# Altium footprint library Smart-PS.PcbLib: 26 footprints (part 1 of 2)
Each footprint in its own frame and in the unit in brackets; x right, y up, seen from the top. Pads: shape width x height; smd on the part's side, far side on the other; paste and mask are expansions set on the pad; w line width, h text height; cw(c..) or ccw(c..) is an arc to the next point about the centre after c.
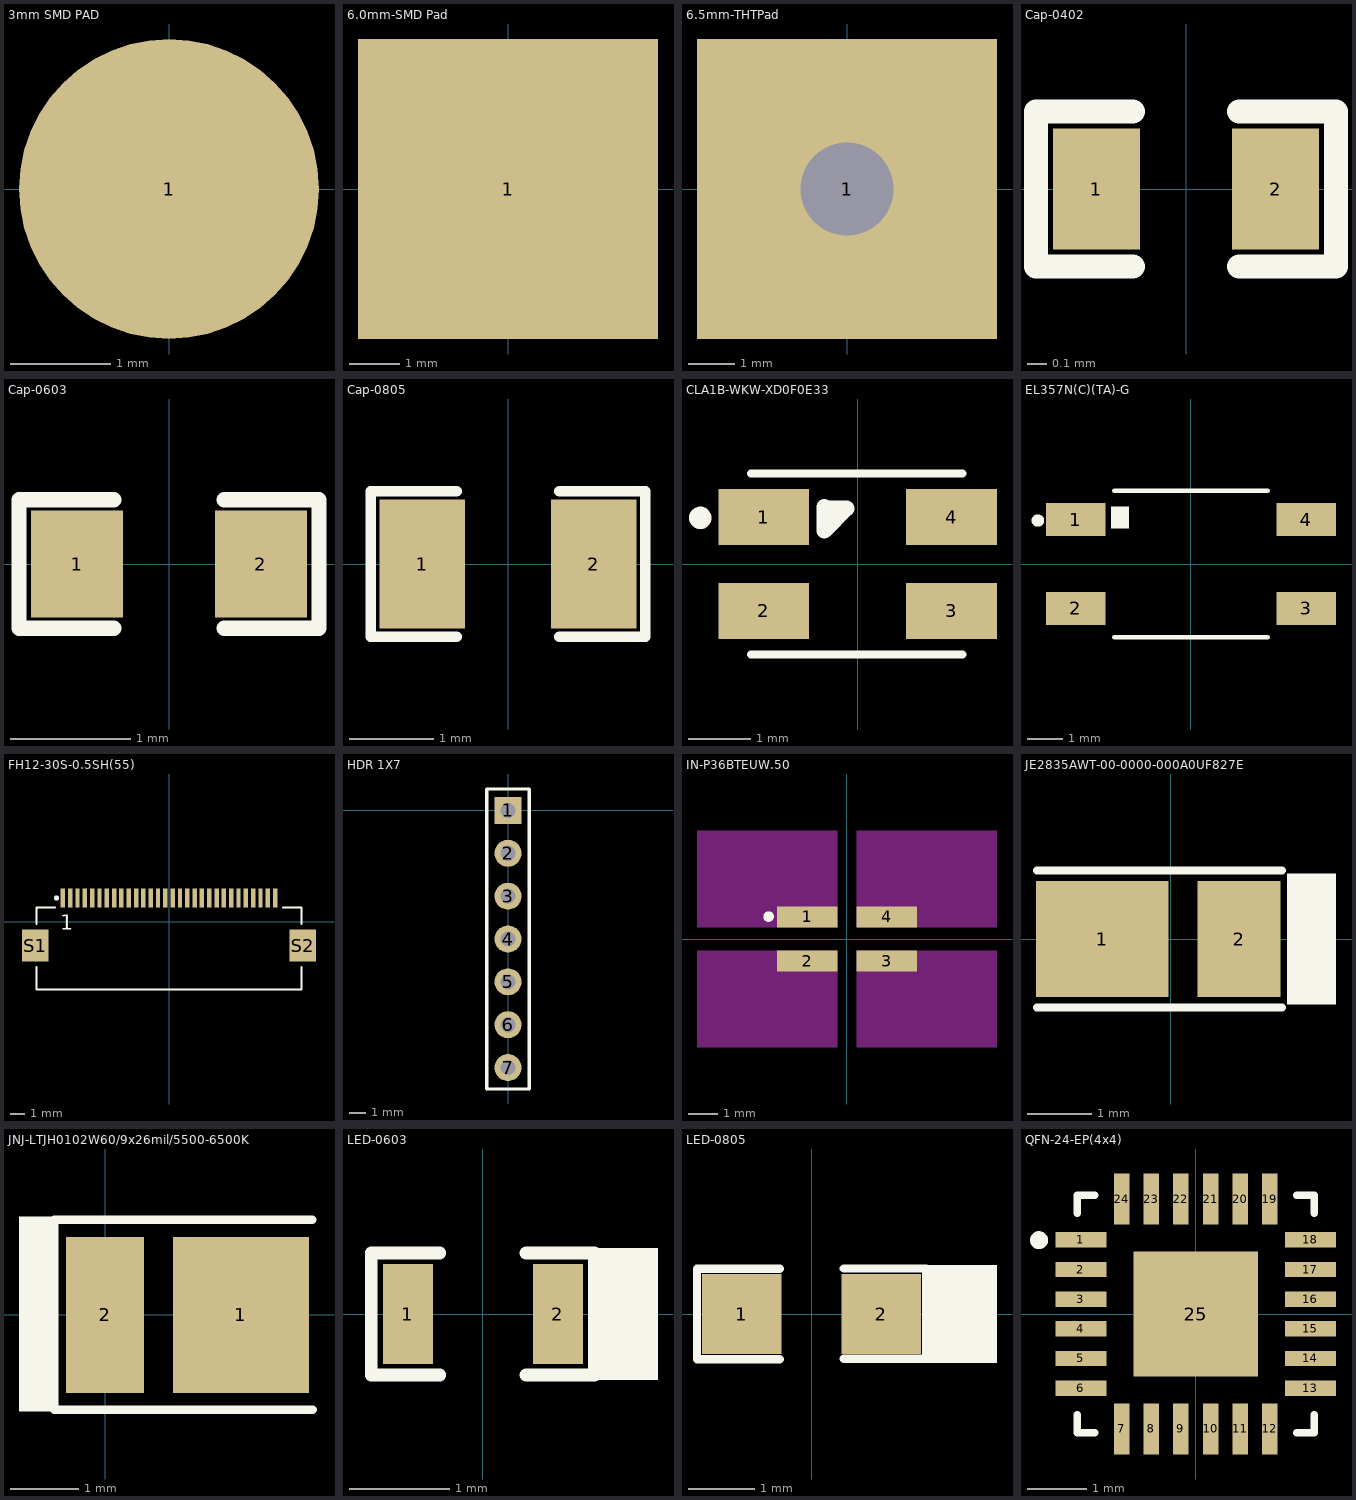
[diagram p0: the footprints below, top view; thin cyan lines are the x and y axes]

## 3mm SMD PAD [mm]
pads (1):
  round 3 smd: 1(0,0)

## 6.0mm-SMD Pad [mm]
pads (1):
  rect 6x6 smd: 1(0,0)

## 6.5mm-THTPad [mil]
pads (1):
  rect 254x254 hole 78.74: 1(0,0)

## Cap-0402 [mil]
pads (2):
  rect 18x25 smd mask+2.36: 1(-18.5,0) 2(18.5,0)
Top Overlay:
  lines w5: -11,-16 -31,-16 -31,16 -11,16 ; 11,-16 31,-16 31,16 11,16
3D body "User Library-Capacitor 0402.step": height 18.5, standoff -1.18, extent -19.68,-9.84 19.7,9.85

## Cap-0603 [mil]
pads (2):
  rect 30x35 smd mask+2.36: 1(-30,0) 2(30,0)
Top Overlay:
  lines w5: -18,-21 -49,-21 -49,21 -18,21 ; 18,-21 49,-21 49,21 18,21
3D body "User Library-CAPC1608X09.step": height 34.25, standoff -1.18, extent -31.51,-15.75 31.49,15.74

## Cap-0805 [mil] "SMD 0805"
pads (2):
  rect 40x60 smd mask+2.76: 1(-40,0) 2(40,0)
Top Overlay:
  lines w5: -24,-34 -64,-34 -64,34 -24,34 ; 24,-34 64,-34 64,34 24,34
3D body "User Library-0805 SMD Capacitor.step": height 30, standoff -0.79, extent -39.36,-24.6 39.38,24.61

## CLA1B-WKW-XD0F0E33 [mm]
pads (4):
  rect 1.45x0.9 smd: 1(-1.5,0.75) 2(-1.5,-0.75) 3(1.5,-0.75) 4(1.5,0.75)
Top Overlay:
  circle w0.254: c-2.515,0.737 r0.051
  lines w0.127: -1.702,-1.448 1.676,-1.448 ; -1.702,1.448 1.676,1.448
  lines w0.254: -0.533,0.914 -0.533,0.533 -0.178,0.889 -0.508,0.889
3D body "step_temp.STEP": height 2.1, standoff 0, extent -1.75,-1.4 1.75,1.4

## EL357N(C)(TA)-G [mm]
pads (4):
  rect 1.7x0.95 smd paste+0 mask+0.051: 1(-3.3,1.27) 2(-3.3,-1.27) 3(3.3,-1.27) 4(3.3,1.27)
Top Overlay:
  circle w0.254: c-4.383,1.244 r0.051
  rectangle: -2.284,1.016 -1.776,1.651
  lines w0.127: -2.2,-2.1 2.2,-2.1 ; -2.2,2.1 2.2,2.1

## FH12-30S-0.5SH(55) [mm]
pads (32):
  rect 0.3x1.3 smd paste-2: 1(-7.25,1.625) 2(-6.75,1.625) 3(-6.25,1.625) 4(-5.75,1.625) 5(-5.25,1.625) 6(-4.75,1.625) 7(-4.25,1.625) 8(-3.75,1.625) 9(-3.25,1.625) 10(-2.75,1.625) 11(-2.25,1.625) 12(-1.75,1.625) 13(-1.25,1.625) 14(-0.75,1.625) 15(-0.25,1.625) 16(0.25,1.625) 17(0.75,1.625) 18(1.25,1.625) 19(1.75,1.625) 20(2.25,1.625) 21(2.75,1.625) 22(3.25,1.625) 23(3.75,1.625) 24(4.25,1.625) 25(4.75,1.625) 26(5.25,1.625) 27(5.75,1.625) 28(6.25,1.625) 29(6.75,1.625) 30(7.25,1.625)
  rect 1.8x2.2 smd: S1(-9.15,-1.625) S2(9.15,-1.625)
Top Overlay:
  circle w0.254: c-7.696,1.626 r0.051
  lines w0.127: -9.05,-3.075 -9.05,-4.625 9.05,-4.625 9.05,-3.075 ; -9.05,-0.148 -9.05,0.975 -7.772,0.975 ; 7.772,0.975 9.05,0.975 9.05,-0.148
  text "1" at -7.423,-0.533 h1.02
3D body "FH12-30S-0.5SH(55)--3DModel-STEP-56544.STEP": height 2.09, standoff -0.01, extent -9.55,-4.622 9.55,1.778

## HDR 1X7 [mm]
pads (7):
  rect 1.6x1.6 hole 0.9: 1(0,0)
  round 1.6 hole 0.9: 2(0,-2.54) 3(0,-5.08) 4(0,-7.62) 5(0,-10.16) 6(0,-12.7) 7(0,-15.24)
Top Overlay:
  lines w0.2: -1.27,-16.51 1.27,-16.51 1.27,1.27 -1.27,1.27 -1.27,-16.51
3D body "User Library-Header_Male_7Pin.STEP": height 8.74, standoff -2.8, extent -1.245,-16.51 1.245,1.27

## IN-P36BTEUW.50 [mm]
pads (4):
  rect 2.05x0.72 smd paste-2: 1(-1.35,0.75) 2(-1.35,-0.75) 3(1.35,-0.75) 4(1.35,0.75)
Top Overlay:
  circle w0.254: c-2.667,0.762 r0.051
Keep-Out Layer:
  rectangle: -5.1,0.39 -0.325,3.69
  region: 5.1,3.69 0.325,3.69 0.325,0.39 5.1,0.39
  rectangle: -5.1,-3.69 -0.325,-0.39
  region: 5.1,-0.39 0.325,-0.39 0.325,-3.69 5.1,-3.69

## JE2835AWT-00-0000-000A0UF827E [mm]
pads (2):
  rect 2.06x1.8 smd: 1(-1.062,0)
  rect 1.29x1.8 smd: 2(1.062,0)
Top Overlay:
  rectangle: 1.808,-1.016 2.57,1.016
  lines w0.127: -2.078,-1.067 1.732,-1.067 ; -2.078,1.067 1.732,1.067

## JNJ-LTJH0102W60/9x26mil/5500-6500K [mm]
pads (2):
  rect 2x2.3 smd mask+0.1: 1(2,0)
  rect 1.15x2.3 smd mask+0.1: 2(0,0)
Top Overlay:
  rectangle: -1.27,-1.422 -0.686,1.448
  lines w0.127: -0.749,-1.4 3.061,-1.4 ; -0.749,1.4 3.048,1.4
3D body "User Library-SMD2835.STEP": height 0.73, standoff 0.01, extent -0.515,-1.4 3.05,1.4

## LED-0603 [mm]
pads (2):
  rect 0.5x1 smd: 1(-0.75,0) 2(0.75,0)
Top Overlay:
  rectangle: 1.118,-0.66 1.753,0.66
  lines w0.127: -0.432,-0.61 -1.118,-0.61 -1.118,0.61 -0.432,0.61 ; 0.432,-0.61 1.118,-0.61 1.118,0.61 0.432,0.61
3D body "User Library-LED SMD0603.step": height 0.68, standoff 0, extent -0.825,-0.369 0.825,0.356

## LED-0805 [mm]
pads (2):
  rect 1.2x1.2 smd: 1(-1.05,0) 2(1.05,0)
Top Overlay:
  rectangle: 1.731,-0.737 2.794,0.737
  lines w0.127: -0.479,-0.681 -1.727,-0.681 -1.727,0.681 -0.479,0.681 ; 0.483,-0.677 1.731,-0.677 1.731,0.686 0.483,0.686
3D body "everlight-17-21-0805LED-YELLOW.STEP": height 1.1, standoff -0.01, extent -1,-0.625 1,0.625

## QFN-24-EP(4x4) [mm]
pads (25):
  rect 0.86x0.26 smd: 1(-1.935,1.25) 2(-1.935,0.75) 3(-1.935,0.25) 4(-1.935,-0.25) 5(-1.935,-0.75) 6(-1.935,-1.25) 13(1.935,-1.25) 14(1.935,-0.75) 15(1.935,-0.25) 16(1.935,0.25) 17(1.935,0.75) 18(1.935,1.25)
  rect 0.26x0.86 smd: 7(-1.25,-1.935) 8(-0.75,-1.935) 9(-0.25,-1.935) 10(0.25,-1.935) 11(0.75,-1.935) 12(1.25,-1.935) 19(1.25,1.935) 20(0.75,1.935) 21(0.25,1.935) 22(-0.25,1.935) 23(-0.75,1.935) 24(-1.25,1.935)
  rect 2.1x2.1 smd paste-0.39: 25(0,0)
Top Overlay:
  circle w0.2: c-2.642,1.245 r0.051
  lines w0.127: -2,-1.7 -2,-2 -1.7,-2 ; -2,1.7 -2,2 -1.7,2 ; 1.7,-2 2,-2 2,-1.7 ; 1.7,2 2,2 2,1.7
3D body "step_temp.STEP": height 0.8, standoff 0, extent -2,-2 2,2